# Altium schematic symbol library KLS7-TS3608.SchLib: 1 symbol
Pins are listed as number, name and electrical type; pins without a type are passive.

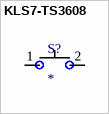
[diagram p0: symbol KLS7-TS3608]

## KLS7-TS3608
designator S?
footprint PCBComponent_1
pins: 1 18, 2 19